# Altium footprint library FootPrintLib_11.PcbLib: 376 footprints (part 5 of 24)
Each footprint in its own frame and in the unit in brackets; x right, y up, seen from the top. Pads: shape width x height; smd on the part's side, far side on the other; paste and mask are expansions set on the pad; w line width, h text height; cw(c..) or ccw(c..) is an arc to the next point about the centre after c.
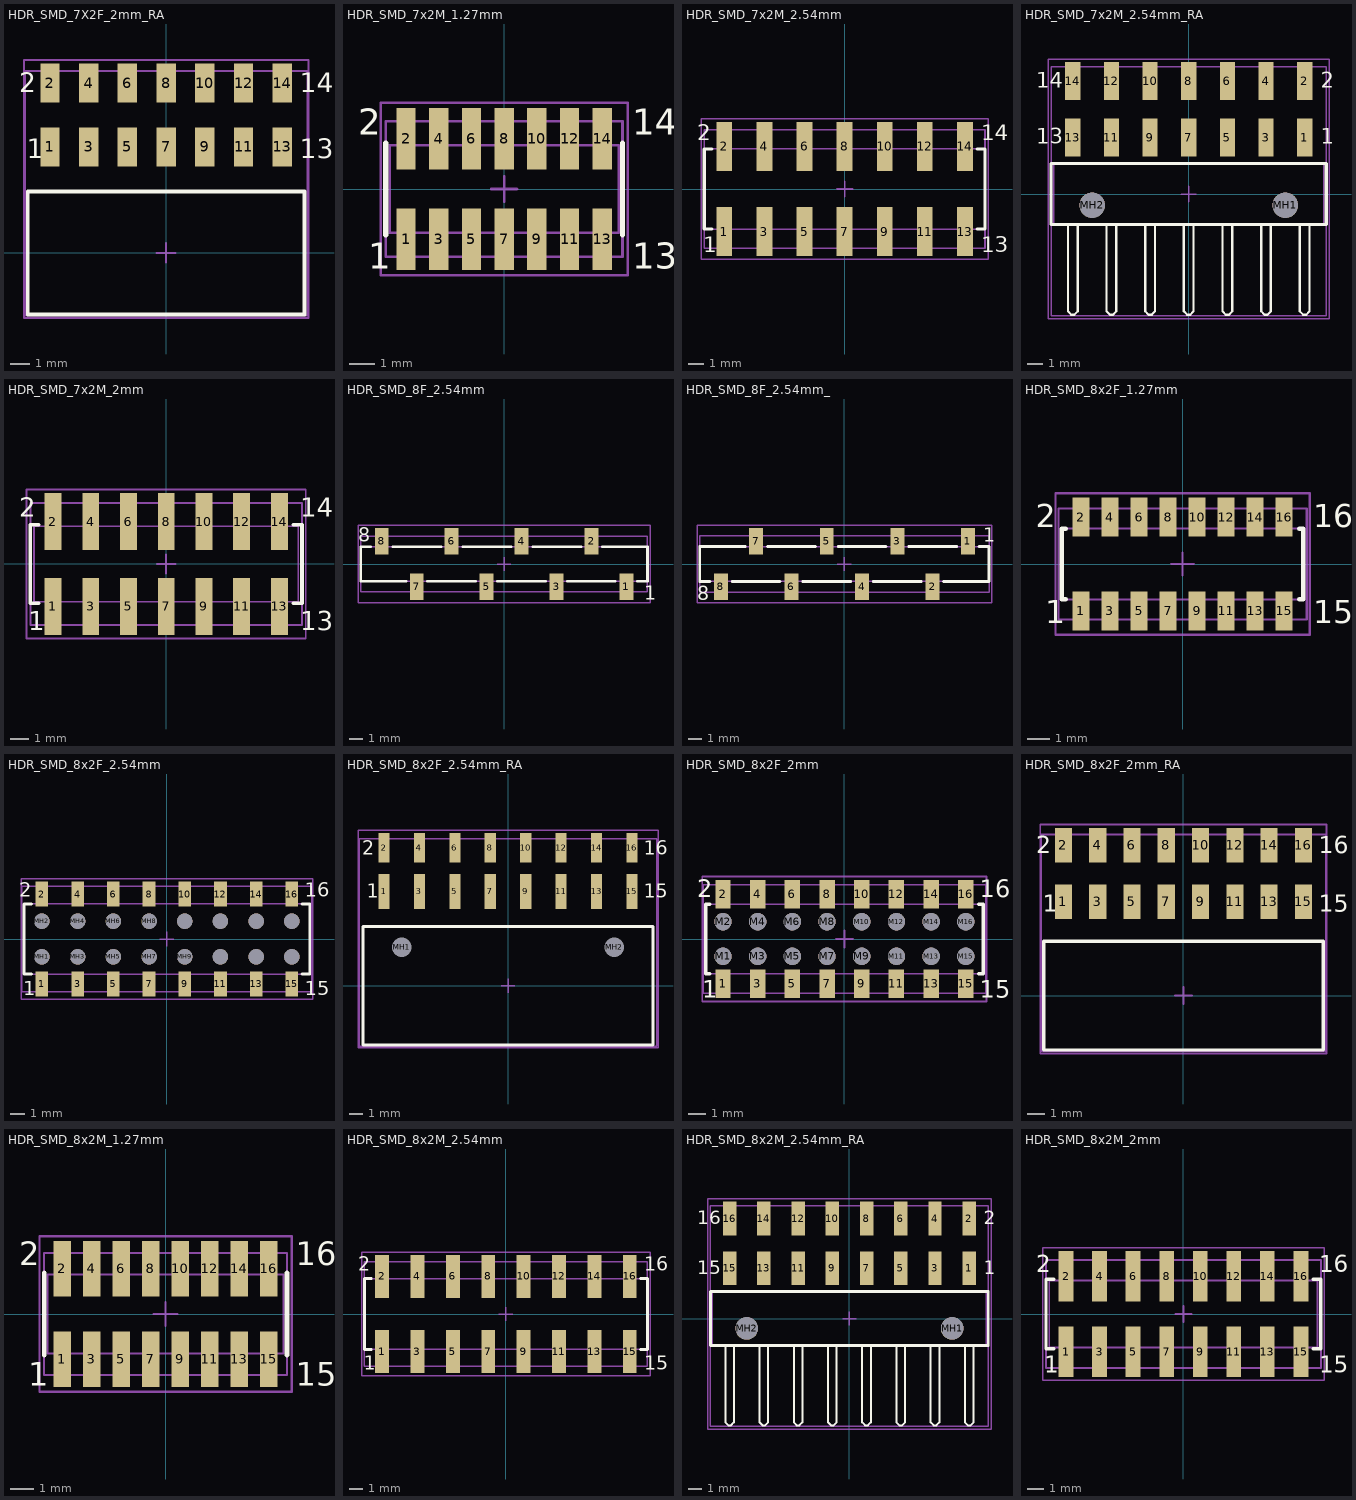
[diagram p4: the footprints below, top view; thin cyan lines are the x and y axes]

## HDR_SMD_7X2F_2mm_RA [mm] "Socket Header, Pitch 2.00 mm, SMT, Angled, dual row, 14p"
height 4.15
pads (14):
  rect 1x2 smd: 1(-6,5.475) 2(-6,8.775) 3(-4,5.475) 4(-4,8.775) 5(-2,5.475) 6(-2,8.775) 7(0,5.475) 8(0,8.775) 9(2,5.475) 10(2,8.775) 11(4,5.475) 12(4,8.775) 13(6,5.475) 14(6,8.775)
Top Overlay:
  lines w0.2: -7.15,-3.175 -7.15,3.175 7.15,3.175 7.15,-3.175 -7.15,-3.175
  text "13" at 6.9,4.9 h1
  text "14" at 6.9,8.3 h1
  text "1" at -7.2,4.9 h1
  text "2" at -7.6,8.3 h1
Mechanical 11:
  lines w0.1: -7.15,-3.175 7.15,-3.175 7.15,3.175 -7.15,3.175 -7.15,-3.175
Mechanical 13:
  lines w0.1: -7.3,-3.25 -7.3,9.4 7.3,9.4 7.3,-3.25 -7.3,-3.25
Mechanical 15:
  lines w0.1: -0.5,0 0.5,0 ; 0,-0.5 0,0.5 ; -7.35,-3.375 7.35,-3.375 7.35,9.975 -7.35,9.975 -7.35,-3.375
3D body "621114284621.stp": height 4.05, standoff 0.05, extent -7.15,-3.175 7.15,9.275

## HDR_SMD_7x2M_1.27mm [mm] "Pin Header, pitch 1.27 mm, SMD, Vertical, dual row, 14p"
height 6.1
pads (14):
  rect 0.75x2.4 smd: 1(-3.81,-1.95) 2(-3.81,1.95) 3(-2.54,-1.95) 4(-2.54,1.95) 5(-1.27,-1.95) 6(-1.27,1.95) 7(0,-1.95) 8(0,1.95) 9(1.27,-1.95) 10(1.27,1.95) 11(2.54,-1.95) 12(2.54,1.95) 13(3.81,-1.95) 14(3.81,1.95)
Top Overlay:
  lines w0.2: -4.595,-1.775 -4.595,1.775 ; 4.595,-1.775 4.595,1.775
  text "2" at -5.675,2.1 h1
  text "1" at -5.275,-3.1 h1
  text "13" at 4.975,-3.1 h1
  text "14" at 4.975,2.1 h1
Mechanical 11:
  lines w0.1: -4.445,-1.7 4.445,-1.7 4.445,1.7 -4.445,1.7 -4.445,-1.7
Mechanical 13:
  lines w0.1: -4.595,-2.625 -4.595,2.625 4.595,2.625 4.595,-2.625 -4.595,-2.625
Mechanical 15:
  lines w0.1: -0.5,0 0.5,0 ; 0,-0.5 0,0.5 ; -4.795,-3.35 -4.795,3.35 4.795,3.35 4.795,-3.35 -4.795,-3.35
3D body "62131421021.stp": height 5.9, standoff 0, extent -4.445,-2.55 4.445,2.55

## HDR_SMD_7x2M_2.54mm [mm] "Pin Header, pitch 2.54 mm, SMD, Vertical, dual row, 14p"
height 9.6
pads (14):
  rect 1x3.1 smd: 1(-7.62,-2.7) 2(-7.62,2.7) 3(-5.08,-2.7) 4(-5.08,2.7) 5(-2.54,-2.7) 6(-2.54,2.7) 7(0,-2.7) 8(0,2.7) 9(2.54,-2.7) 10(2.54,2.7) 11(5.08,-2.7) 12(5.08,2.7) 13(7.62,-2.7) 14(7.62,2.7)
Top Overlay:
  lines w0.2: -8.4,-2.54 -8.89,-2.54 -8.89,2.54 -8.4,2.54 ; 8.4,-2.54 8.89,-2.54 8.89,2.54 8.4,2.54
  text "14" at 8.65,3.1 h1
  text "13" at 8.65,-4 h1
  text "1" at -8.95,-4 h1
  text "2" at -9.35,3.1 h1
Mechanical 11:
  lines w0.1: -8.89,-2.54 8.89,-2.54 8.89,2.54 -8.89,2.54 -8.89,-2.54
Mechanical 13:
  lines w0.1: -8.89,-3.75 -8.89,3.75 8.89,3.75 8.89,-3.75 -8.89,-3.75
Mechanical 15:
  lines w0.1: -0.5,0 0.5,0 ; 0,-0.5 0,0.5 ; -9.09,-4.45 -9.09,4.45 9.09,4.45 9.09,-4.45 -9.09,-4.45
3D body "61001421121.stp": height 9.62, standoff 0.02, extent -8.89,-3.75 8.89,3.75

## HDR_SMD_7x2M_2.54mm_RA [mm] "Pin Header, pitch 2.54 mm, SMD, Angled, dual row, 14p"
height 5.08
pads (16):
  rect 1x2.5 smd: 1(7.62,3.72) 2(7.62,7.42) 3(5.08,3.72) 4(5.08,7.42) 5(2.54,3.72) 6(2.54,7.42) 7(0,3.72) 8(0,7.42) 9(-2.54,3.72) 10(-2.54,7.42) 11(-5.08,3.72) 12(-5.08,7.42) 13(-7.62,3.72) 14(-7.62,7.42)
  round 1.68 hole 1.68 unplated: MH1(6.35,-0.73) MH2(-6.35,-0.73)
Top Overlay:
  lines w0.15: -7.94,-2 -7.94,-7.3 -7.94,-7.58 -7.94,-7.705 -7.72,-7.925 -7.52,-7.925 -7.3,-7.705 -7.3,-7.58 -7.3,-7.3 -7.3,-2 ; -5.4,-2 -5.4,-7.3 -5.4,-7.58 -5.4,-7.705 -5.18,-7.925 -4.98,-7.925 -4.76,-7.705 -4.76,-7.58 -4.76,-7.3 -4.76,-2 ; -2.86,-2 -2.86,-7.3 -2.86,-7.58 -2.86,-7.705 -2.64,-7.925 -2.44,-7.925 -2.22,-7.705 -2.22,-7.58 -2.22,-7.3 -2.22,-2 ; -0.32,-2 -0.32,-7.3 -0.32,-7.58 -0.32,-7.705 -0.1,-7.925 0.1,-7.925 0.32,-7.705 0.32,-7.58 0.32,-7.3 0.32,-2 ; 2.22,-2 2.22,-7.3 2.22,-7.58 2.22,-7.705 2.44,-7.925 2.64,-7.925 2.86,-7.705 2.86,-7.58 2.86,-7.3 2.86,-2 ; 4.76,-2 4.76,-7.3 4.76,-7.58 4.76,-7.705 4.98,-7.925 5.18,-7.925 5.4,-7.705 5.4,-7.58 5.4,-7.3 5.4,-2 ; 7.3,-2 7.3,-7.3 7.3,-7.58 7.3,-7.705 7.52,-7.925 7.72,-7.925 7.94,-7.705 7.94,-7.58 7.94,-7.3 7.94,-2
  lines w0.2: -9.04,-2 -9.04,2 9.04,2 9.04,-2 -9.04,-2
  text "13" at -10.04,3.3 h1
  text "14" at -10.04,7 h1
  text "2" at 8.68,7 h1
  text "1" at 8.68,3.3 h1
Mechanical 11:
  lines w0.1: -8.89,-2 -8.89,2 8.89,2 8.89,-2 -8.89,-2
Mechanical 13:
  lines w0.1: -9.04,-8 -9.04,8.36 9.04,8.36 9.04,-8 -9.04,-8
Mechanical 15:
  lines w0.1: -0.5,0 0.5,0 ; 0,-0.5 0,0.5 ; -9.24,-8.2 9.24,-8.2 9.24,8.87 -9.24,8.87 -9.24,-8.2
3D body "610114249121.stp": height 5.1, standoff -1.38, extent -8.89,-8 8.89,8.16

## HDR_SMD_7x2M_2mm [mm] "Pin Header, pitch 2.00 mm, SMD, Vertical, dual row, 14p"
height 6.8
pads (14):
  rect 0.89x3 smd: 1(-6,-2.25) 2(-6,2.25) 3(-4,-2.25) 4(-4,2.25) 5(-2,-2.25) 6(-2,2.25) 7(0,-2.25) 8(0,2.25) 9(2,-2.25) 10(2,2.25) 11(4,-2.25) 12(4,2.25) 13(6,-2.25) 14(6,2.25)
Top Overlay:
  lines w0.2: -6.75,-2.075 -7.2,-2.075 -7.2,2.075 -6.75,2.075 ; 6.75,-2.075 7.2,-2.075 7.2,2.075 6.75,2.075
  text "2" at -7.8,2.5 h1
  text "1" at -7.3,-3.5 h1
  text "14" at 7.1,2.5 h1
  text "13" at 7.1,-3.5 h1
Mechanical 11:
  lines w0.1: -7,-2 -7,2 7,2 7,-2 -7,-2
Mechanical 13:
  lines w0.1: -7.2,-3.225 7.2,-3.225 7.2,3.225 -7.2,3.225 -7.2,-3.225
Mechanical 15:
  lines w0.1: -0.5,0 0.5,0 ; 0,-0.5 0,0.5 ; -7.4,-3.95 7.4,-3.95 7.4,3.95 -7.4,3.95 -7.4,-3.95
3D body "62131421921.stp": height 6.7, standoff 0, extent -7,-3.1 7,3.1

## HDR_SMD_8F_2.54mm [mm] "Socket Header, Pitch 2.54 mm, SMT, Vertical, single row, 8p"
height 7.5
pads (8):
  rect 1x1.91 smd: 1(8.89,-1.645) 2(6.35,1.645) 3(3.81,-1.645) 4(1.27,1.645) 5(-1.27,-1.645) 6(-3.81,1.645) 7(-6.35,-1.645) 8(-8.89,1.645)
Top Overlay:
  lines w0.2: -9.68,1.25 -10.41,1.25 -10.41,-1.25 -7.13,-1.25 ; -8.08,1.25 -4.58,1.25 ; -5.58,-1.25 -2.08,-1.25 ; -3,1.25 0.5,1.25 ; -0.5,-1.25 3,-1.25 ; 2.08,1.25 5.58,1.25 ; 4.58,-1.25 8.08,-1.25 ; 7.13,1.25 10.41,1.25 10.41,-1.25 9.68,-1.25
  text "1" at 10.18,-2.6 h1
  text "8" at -10.58,1.6 h1
Mechanical 11:
  lines w0.1: -10.41,-1.25 10.41,-1.25 10.41,1.25 -10.41,1.25 -10.41,-1.25
Mechanical 13:
  lines w0.1: -10.41,-2.025 10.41,-2.025 10.41,2.025 -10.41,2.025 -10.41,-2.025
Mechanical 15:
  lines w0.1: -0.5,0 0.5,0 ; 0,-0.5 0,0.5 ; -10.61,-2.8 10.61,-2.8 10.61,2.8 -10.61,2.8 -10.61,-2.8
3D body "61000811921.stp": height 7.5, standoff 0, extent -10.41,-2.025 10.41,2.025

## HDR_SMD_8F_2.54mm_ [mm] "Socket Header, Pitch 2.54 mm, SMT, Vertical, single row, 8p"
height 7.5
pads (8):
  rect 1x1.91 smd: 1(8.89,1.645) 2(6.35,-1.645) 3(3.81,1.645) 4(1.27,-1.645) 5(-1.27,1.645) 6(-3.81,-1.645) 7(-6.35,1.645) 8(-8.89,-1.645)
Top Overlay:
  lines w0.2: -9.68,-1.25 -10.41,-1.25 -10.41,1.25 -7.13,1.25 ; -8.08,-1.25 -4.63,-1.25 ; -5.53,1.25 -2.08,1.25 ; -3,-1.25 0.45,-1.25 ; -0.45,1.25 3,1.25 ; 2.08,-1.25 5.53,-1.25 ; 4.63,1.25 8.08,1.25 ; 7.13,-1.25 10.41,-1.25 10.41,1.25 9.68,1.25
  text "8" at -10.58,-2.6 h1
  text "1" at 9.98,1.6 h1
Mechanical 11:
  lines w0.1: -10.41,-1.25 -10.41,1.25 10.41,1.25 10.41,-1.25 -10.41,-1.25
Mechanical 13:
  lines w0.1: -10.41,-2.025 10.41,-2.025 10.41,2.025 -10.41,2.025 -10.41,-2.025
Mechanical 15:
  lines w0.1: -0.5,0 0.5,0 ; 0,-0.5 0,0.5 ; -10.61,-2.8 10.61,-2.8 10.61,2.8 -10.61,2.8 -10.61,-2.8
3D body "61000813321.stp": height 7.5, standoff 0, extent -10.41,-2.025 10.41,2.025

## HDR_SMD_8x2F_1.27mm [mm] "Socket Header, Pitch 1.27 mm, SMT, Vertical, dual row, 16p"
height 4.7
pads (16):
  rect 0.74x1.7 smd: 1(-4.445,-2.05) 2(-4.445,2.05) 3(-3.175,-2.05) 4(-3.175,2.05) 5(-1.905,-2.05) 6(-1.905,2.05) 7(-0.635,-2.05) 8(-0.635,2.05) 9(0.635,-2.05) 10(0.635,2.05) 11(1.905,-2.05) 12(1.905,2.05) 13(3.175,-2.05) 14(3.175,2.05) 15(4.445,-2.05) 16(4.445,2.05)
Top Overlay:
  lines w0.2: -5.11,-1.55 -5.28,-1.55 -5.28,1.55 -5.11,1.55 ; 5.11,-1.55 5.28,-1.55 5.28,1.55 5.11,1.55
  text "1" at -6.01,-2.6 h1
  text "2" at -6.41,1.6 h1
  text "15" at 5.71,-2.6 h1
  text "16" at 5.71,1.6 h1
Mechanical 11:
  lines w0.1: -5.28,-1.55 5.28,-1.55 5.28,1.55 -5.28,1.55 -5.28,-1.55
Mechanical 13:
  lines w0.1: -5.43,-2.425 -5.43,2.425 5.43,2.425 5.43,-2.425 -5.43,-2.425
Mechanical 15:
  lines w0.1: -0.5,0 0.5,0 ; 0,-0.5 0,0.5 ; -5.56,-3.1 -5.56,3.1 5.56,3.1 5.56,-3.1 -5.56,-3.1
3D body "62301621021.stp": height 4.6, standoff 0, extent -5.28,-2.299 5.28,2.299

## HDR_SMD_8x2F_2.54mm [mm] "Socket Header, Pitch 2.54 mm, SMT, Vertical, dual row, 16p"
height 3.7
pads (32):
  rect 0.9x1.8 smd: 1(-8.89,-3.2) 2(-8.89,3.2) 3(-6.35,-3.2) 4(-6.35,3.2) 5(-3.81,-3.2) 6(-3.81,3.2) 7(-1.27,-3.2) 8(-1.27,3.2) 9(1.27,-3.2) 10(1.27,3.2) 11(3.81,-3.2) 12(3.81,3.2) 13(6.35,-3.2) 14(6.35,3.2) 15(8.89,-3.2) 16(8.89,3.2)
  round 1.1 hole 1.1 unplated: MH1(-8.89,-1.27) MH2(-8.89,1.27) MH3(-6.35,-1.27) MH4(-6.35,1.27) MH5(-3.81,-1.27) MH6(-3.81,1.27) MH7(-1.27,-1.27) MH8(-1.27,1.27) MH9(1.27,-1.27) MH10(1.27,1.27) MH11(3.81,-1.27) MH12(3.81,1.27) MH13(6.35,-1.27) MH14(6.35,1.27) MH15(8.89,-1.27) MH16(8.89,1.27)
Top Overlay:
  lines w0.2: -9.62,-2.5 -10.16,-2.5 -10.16,2.5 -9.62,2.5 ; 9.62,-2.5 10.16,-2.5 10.16,2.5 9.62,2.5
  text "15" at 9.82,-4 h1
  text "16" at 9.82,3 h1
  text "1" at -10.22,-4 h1
  text "2" at -10.52,3 h1
Mechanical 11:
  lines w0.1: -10.16,-2.5 -10.16,2.5 10.16,2.5 10.16,-2.5 -10.16,-2.5
Mechanical 13:
  lines w0.1: -10.31,-3.75 -10.31,3.75 10.31,3.75 10.31,-3.75 -10.31,-3.75
Mechanical 15:
  lines w0.1: -0.5,0 0.5,0 ; 0,-0.5 0,0.5 ; -10.36,-4.3 -10.36,4.3 10.36,4.3 10.36,-4.3 -10.36,-4.3
3D body "610016243021.stp": height 3.7, standoff 0, extent -10.16,-3.603 10.16,3.603

## HDR_SMD_8x2F_2.54mm_RA [mm] "Socket Header, Pitch 2.54 mm, SMT, Angled, dual row, 16p"
height 5.2
pads (18):
  rect 0.8x2.5 smd: 1(-8.89,6.76) 3(-6.35,6.76) 5(-3.81,6.76) 7(-1.27,6.76) 9(1.27,6.76) 11(3.81,6.76) 13(6.35,6.76) 15(8.89,6.76)
  rect 0.8x2.1 smd: 2(-8.89,9.89) 4(-6.35,9.89) 6(-3.81,9.89) 8(-1.27,9.89) 10(1.27,9.89) 12(3.81,9.89) 14(6.35,9.89) 16(8.89,9.89)
  round 1.3 hole 1.4 unplated: MH1(-7.62,2.75) MH2(7.62,2.75)
Top Overlay:
  lines w0.2: -10.41,-4.25 -10.41,4.25 10.41,4.25 10.41,-4.25 -10.41,-4.25
  text "2" at -10.45,9.4 h1
  text "1" at -10.15,6.3 h1
  text "15" at 9.75,6.3 h1
  text "16" at 9.75,9.4 h1
Mechanical 11:
  lines w0.1: -10.41,-4.25 -10.41,4.25 10.41,4.25 10.41,-4.25 -10.41,-4.25
Mechanical 13:
  lines w0.1: -10.66,-4.35 -10.66,10.54 10.66,10.54 10.66,-4.35 -10.66,-4.35
Mechanical 15:
  lines w0.1: -0.5,0 0.5,0 ; 0,-0.5 0,0.5 ; -10.76,-4.45 -10.76,11.14 10.76,11.14 10.76,-4.45 -10.76,-4.45
3D body "610116249221.stp": height 5.03, standoff -1.27, extent -10.41,-4.25 10.41,10.44

## HDR_SMD_8x2F_2mm [mm] "Socket Header, Pitch 2.00 mm, SMT, Vertical, dual row, 16p"
height 2.35
pads (32):
  rect 0.89x1.65 smd: 1(-7,-2.575) 2(-7,2.575) 3(-5,-2.575) 4(-5,2.575) 5(-3,-2.575) 6(-3,2.575) 7(-1,-2.575) 8(-1,2.575) 9(1,-2.575) 10(1,2.575) 11(3,-2.575) 12(3,2.575) 13(5,-2.575) 14(5,2.575) 15(7,-2.575) 16(7,2.575)
  round 1 hole 1 unplated: M1(-7,-1) M2(-7,1) M3(-5,-1) M4(-5,1) M5(-3,-1) M6(-3,1) M7(-1,-1) M8(-1,1) M9(1,-1) M10(1,1) M11(3,-1) M12(3,1) M13(5,-1) M14(5,1) M15(7,-1) M16(7,1)
Top Overlay:
  lines w0.2: -7.75,-2 -8,-2 -8,2 -7.75,2 ; 7.75,-2 8,-2 8,2 7.75,2
  text "1" at -8.2,-3.4 h1
  text "2" at -8.5,2.4 h1
  text "15" at 7.8,-3.4 h1
  text "16" at 7.8,2.4 h1
Mechanical 11:
  lines w0.1: -8,-2 8,-2 8,2 -8,2 -8,-2
Mechanical 13:
  lines w0.1: -8.15,-3.125 8.15,-3.125 8.15,3.125 -8.15,3.125 -8.15,-3.125
Mechanical 15:
  lines w0.1: -0.5,0 0.5,0 ; 0,-0.5 0,0.5 ; -8.2,-3.6 8.2,-3.6 8.2,3.6 -8.2,3.6 -8.2,-3.6
3D body "62101621821.stp": height 2.1, standoff 0, extent -8,-3 8,3

## HDR_SMD_8x2F_2mm_RA [mm] "Socket Header, Pitch 2.00 mm, SMT, Angled, dual row, 16p"
height 4.15
pads (16):
  rect 1x2 smd: 1(-7,5.475) 2(-7,8.775) 3(-5,5.475) 4(-5,8.775) 5(-3,5.475) 6(-3,8.775) 7(-1,5.475) 8(-1,8.775) 9(1,5.475) 10(1,8.775) 11(3,5.475) 12(3,8.775) 13(5,5.475) 14(5,8.775) 15(7,5.475) 16(7,8.775)
Top Overlay:
  lines w0.2: -8.15,-3.175 -8.15,3.175 8.15,3.175 8.15,-3.175 -8.15,-3.175
  text "15" at 7.9,4.9 h1
  text "16" at 7.9,8.3 h1
  text "1" at -8.2,4.9 h1
  text "2" at -8.6,8.3 h1
Mechanical 11:
  lines w0.1: -8.15,-3.175 8.15,-3.175 8.15,3.175 -8.15,3.175 -8.15,-3.175
Mechanical 13:
  lines w0.1: -8.3,-3.25 -8.3,9.4 8.3,9.4 8.3,-3.25 -8.3,-3.25
Mechanical 15:
  lines w0.1: -0.5,0 0.5,0 ; 0,-0.5 0,0.5 ; -8.35,-3.375 8.35,-3.375 8.35,9.975 -8.35,9.975 -8.35,-3.375
3D body "621116284621.stp": height 4.05, standoff 0.05, extent -8.15,-3.175 8.15,9.275

## HDR_SMD_8x2M_1.27mm [mm] "Pin Header, pitch 1.27 mm, SMD, Vertical, dual row, 16p"
height 6.1
pads (16):
  rect 0.75x2.4 smd: 1(-4.445,-1.95) 2(-4.445,1.95) 3(-3.175,-1.95) 4(-3.175,1.95) 5(-1.905,-1.95) 6(-1.905,1.95) 7(-0.635,-1.95) 8(-0.635,1.95) 9(0.635,-1.95) 10(0.635,1.95) 11(1.905,-1.95) 12(1.905,1.95) 13(3.175,-1.95) 14(3.175,1.95) 15(4.445,-1.95) 16(4.445,1.95)
Top Overlay:
  lines w0.2: -5.23,-1.775 -5.23,1.775 ; 5.23,-1.775 5.23,1.775
  text "2" at -6.31,2.1 h1
  text "1" at -5.91,-3.1 h1
  text "15" at 5.61,-3.1 h1
  text "16" at 5.61,2.1 h1
Mechanical 11:
  lines w0.1: -5.08,-1.7 5.08,-1.7 5.08,1.7 -5.08,1.7 -5.08,-1.7
Mechanical 13:
  lines w0.1: -5.23,-2.625 -5.23,2.625 5.23,2.625 5.23,-2.625 -5.23,-2.625
Mechanical 15:
  lines w0.1: -0.5,0 0.5,0 ; 0,-0.5 0,0.5 ; -5.43,-3.35 -5.43,3.35 5.43,3.35 5.43,-3.35 -5.43,-3.35
3D body "62131621021.stp": height 5.9, standoff 0, extent -5.08,-2.55 5.08,2.55

## HDR_SMD_8x2M_2.54mm [mm] "Pin Header, pitch 2.54 mm, SMD, Vertical, dual row, 16p"
height 9.6
pads (16):
  rect 1x3.1 smd: 1(-8.89,-2.7) 2(-8.89,2.7) 3(-6.35,-2.7) 4(-6.35,2.7) 5(-3.81,-2.7) 6(-3.81,2.7) 7(-1.27,-2.7) 8(-1.27,2.7) 9(1.27,-2.7) 10(1.27,2.7) 11(3.81,-2.7) 12(3.81,2.7) 13(6.35,-2.7) 14(6.35,2.7) 15(8.89,-2.7) 16(8.89,2.7)
Top Overlay:
  lines w0.2: -9.67,-2.54 -10.16,-2.54 -10.16,2.54 -9.67,2.54 ; 9.67,-2.54 10.16,-2.54 10.16,2.54 9.67,2.54
  text "16" at 9.92,3.1 h1
  text "15" at 9.92,-4 h1
  text "1" at -10.22,-4 h1
  text "2" at -10.62,3.1 h1
Mechanical 11:
  lines w0.1: -10.16,-2.54 10.16,-2.54 10.16,2.54 -10.16,2.54 -10.16,-2.54
Mechanical 13:
  lines w0.1: -10.16,-3.75 -10.16,3.75 10.16,3.75 10.16,-3.75 -10.16,-3.75
Mechanical 15:
  lines w0.1: -0.5,0 0.5,0 ; 0,-0.5 0,0.5 ; -10.36,-4.45 -10.36,4.45 10.36,4.45 10.36,-4.45 -10.36,-4.45
3D body "61001621121.stp": height 9.62, standoff 0.02, extent -10.16,-3.75 10.16,3.75

## HDR_SMD_8x2M_2.54mm_RA [mm] "Pin Header, pitch 2.54 mm, SMD, Angled, dual row, 16p"
height 5.08
pads (18):
  rect 1x2.5 smd: 1(8.89,3.72) 2(8.89,7.42) 3(6.35,3.72) 4(6.35,7.42) 5(3.81,3.72) 6(3.81,7.42) 7(1.27,3.72) 8(1.27,7.42) 9(-1.27,3.72) 10(-1.27,7.42) 11(-3.81,3.72) 12(-3.81,7.42) 13(-6.35,3.72) 14(-6.35,7.42) 15(-8.89,3.72) 16(-8.89,7.42)
  round 1.68 hole 1.68 unplated: MH1(7.62,-0.73) MH2(-7.62,-0.73)
Top Overlay:
  lines w0.15: -9.21,-2 -9.21,-7.3 -9.21,-7.58 -9.21,-7.705 -8.99,-7.925 -8.79,-7.925 -8.57,-7.705 -8.57,-7.58 -8.57,-7.3 -8.57,-2 ; -6.67,-2 -6.67,-7.3 -6.67,-7.58 -6.67,-7.705 -6.45,-7.925 -6.25,-7.925 -6.03,-7.705 -6.03,-7.58 -6.03,-7.3 -6.03,-2 ; -4.13,-2 -4.13,-7.3 -4.13,-7.58 -4.13,-7.705 -3.91,-7.925 -3.71,-7.925 -3.49,-7.705 -3.49,-7.58 -3.49,-7.3 -3.49,-2 ; -1.59,-2 -1.59,-7.3 -1.59,-7.58 -1.59,-7.705 -1.37,-7.925 -1.17,-7.925 -0.95,-7.705 -0.95,-7.58 -0.95,-7.3 -0.95,-2 ; 0.95,-2 0.95,-7.3 0.95,-7.58 0.95,-7.705 1.17,-7.925 1.37,-7.925 1.59,-7.705 1.59,-7.58 1.59,-7.3 1.59,-2 ; 3.49,-2 3.49,-7.3 3.49,-7.58 3.49,-7.705 3.71,-7.925 3.91,-7.925 4.13,-7.705 4.13,-7.58 4.13,-7.3 4.13,-2 ; 6.03,-2 6.03,-7.3 6.03,-7.58 6.03,-7.705 6.25,-7.925 6.45,-7.925 6.67,-7.705 6.67,-7.58 6.67,-7.3 6.67,-2 ; 8.57,-2 8.57,-7.3 8.57,-7.58 8.57,-7.705 8.79,-7.925 8.99,-7.925 9.21,-7.705 9.21,-7.58 9.21,-7.3 9.21,-2
  lines w0.2: -10.31,-2 10.31,-2 10.31,2 -10.31,2 -10.31,-2
  text "15" at -11.31,3.3 h1
  text "16" at -11.31,7 h1
  text "1" at 9.95,3.3 h1
  text "2" at 9.95,7 h1
Mechanical 11:
  lines w0.1: -10.16,-2 10.16,-2 10.16,2 -10.16,2 -10.16,-2
Mechanical 13:
  lines w0.1: -10.31,-8 10.31,-8 10.31,8.36 -10.31,8.36 -10.31,-8
Mechanical 15:
  lines w0.1: -0.5,0 0.5,0 ; 0,-0.5 0,0.5 ; -10.51,-8.2 -10.51,8.87 10.51,8.87 10.51,-8.2 -10.51,-8.2
3D body "610116249121.stp": height 5.1, standoff -1.38, extent -10.16,-8 10.16,8.16

## HDR_SMD_8x2M_2mm [mm] "Pin Header, pitch 2.00 mm, SMD, Vertical, dual row, 16p"
height 6.8
pads (16):
  rect 0.89x3 smd: 1(-7,-2.25) 2(-7,2.25) 3(-5,-2.25) 4(-5,2.25) 5(-3,-2.25) 6(-3,2.25) 7(-1,-2.25) 8(-1,2.25) 9(1,-2.25) 10(1,2.25) 11(3,-2.25) 12(3,2.25) 13(5,-2.25) 14(5,2.25) 15(7,-2.25) 16(7,2.25)
Top Overlay:
  lines w0.2: -7.75,-2.075 -8.2,-2.075 -8.2,2.075 -7.75,2.075 ; 7.75,-2.075 8.2,-2.075 8.2,2.075 7.75,2.075
  text "2" at -8.8,2.5 h1
  text "1" at -8.3,-3.5 h1
  text "16" at 8.1,2.5 h1
  text "15" at 8.1,-3.5 h1
Mechanical 11:
  lines w0.1: -8,-2 -8,2 8,2 8,-2 -8,-2
Mechanical 13:
  lines w0.1: -8.2,-3.225 8.2,-3.225 8.2,3.225 -8.2,3.225 -8.2,-3.225
Mechanical 15:
  lines w0.1: -0.5,0 0.5,0 ; 0,-0.5 0,0.5 ; -8.4,-3.95 8.4,-3.95 8.4,3.95 -8.4,3.95 -8.4,-3.95
3D body "62131621921.stp": height 6.7, standoff 0, extent -8,-3.1 8,3.1